# Altium footprint library FootPrintLib_0.PcbLib: 266 footprints (part 7 of 17)
Each footprint in its own frame and in the unit in brackets; x right, y up, seen from the top. Pads: shape width x height; smd on the part's side, far side on the other; paste and mask are expansions set on the pad; w line width, h text height; cw(c..) or ccw(c..) is an arc to the next point about the centre after c.
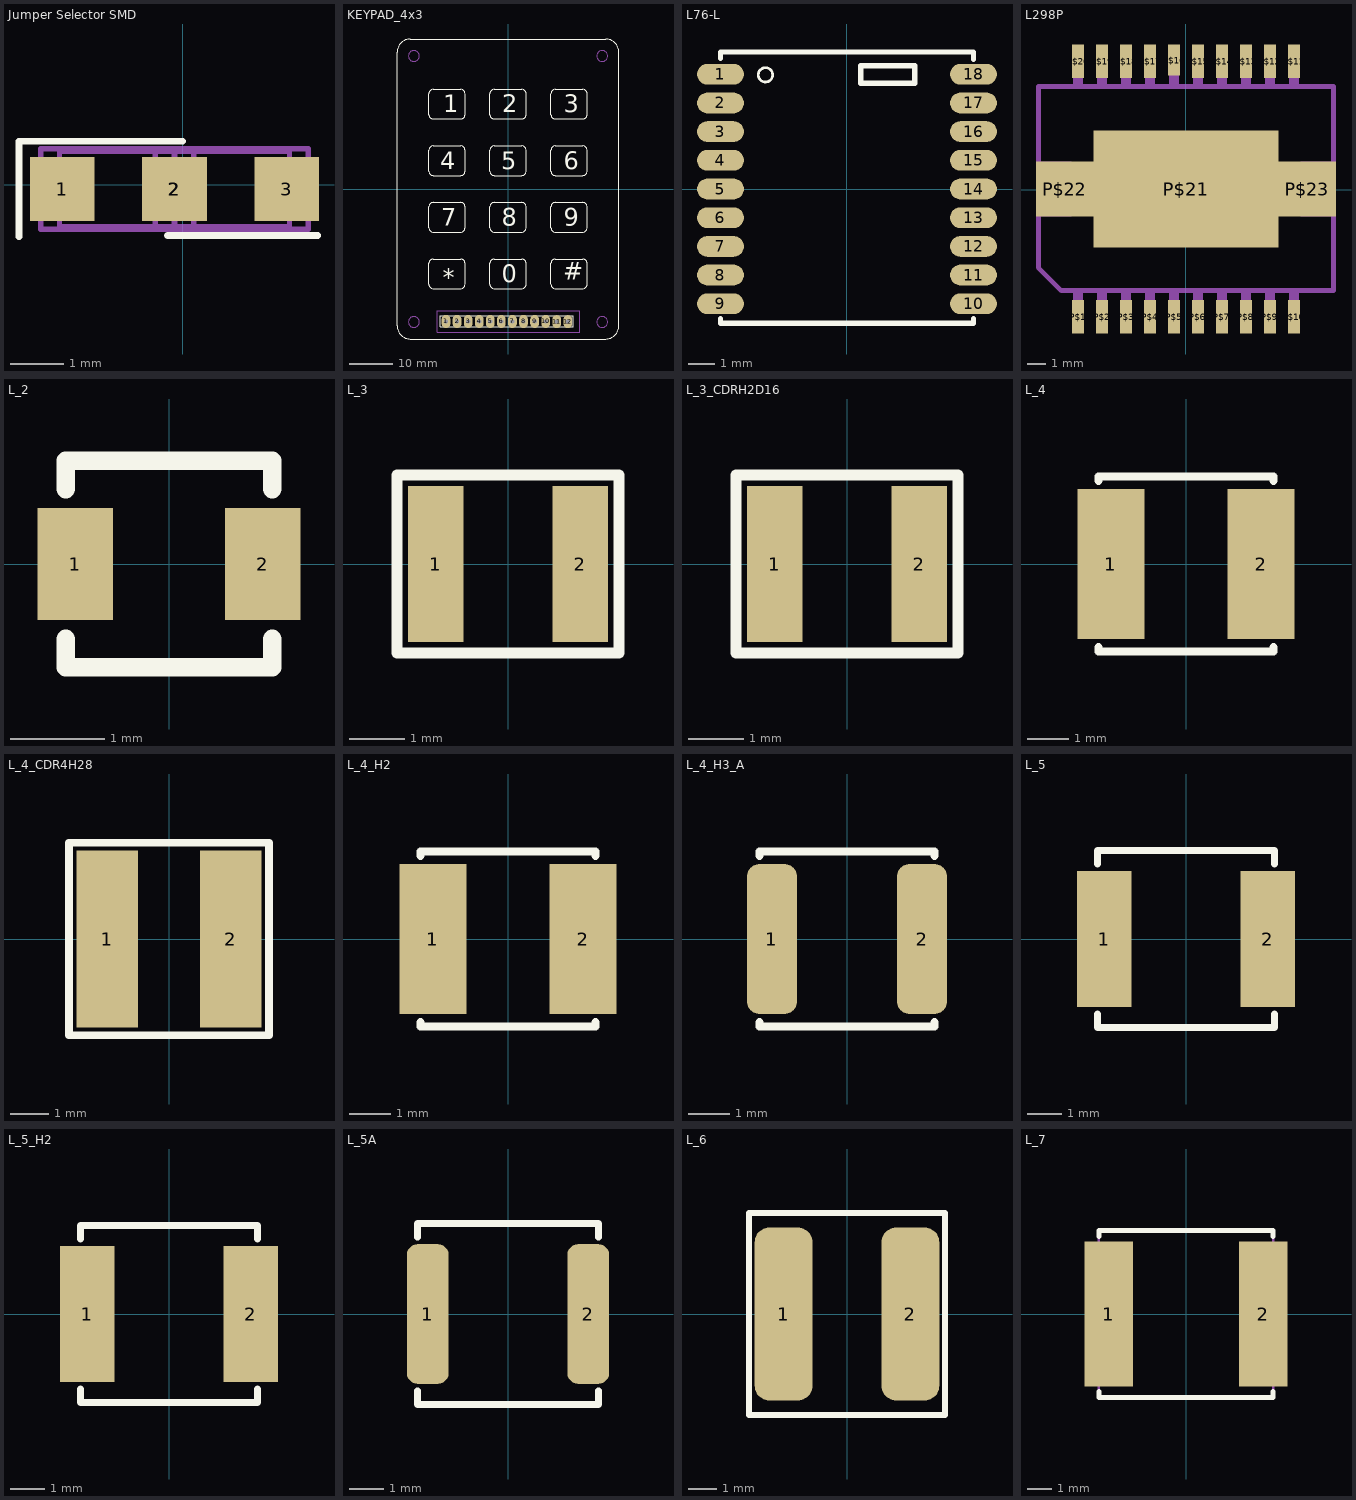
[diagram p6: the footprints below, top view; thin cyan lines are the x and y axes]

## Jumper Selector SMD [mm]
pads (4):
  rect 1.2x1.2 smd: 1(-2.244,-0.076) 2(-0.161,-0.076) 2(-0.144,-0.076) 3(1.939,-0.076)
Top Overlay:
  lines w0.127: -3.048,-0.965 -3.048,0.813 0,0.813 ; -0.279,-0.94 2.515,-0.94
Mechanical 13:
  lines w0.1: -2.294,-0.776 -2.294,0.624 -0.144,0.624 -0.144,-0.776 -2.294,-0.776 ; -0.161,-0.776 -0.161,0.624 1.989,0.624 1.989,-0.776 -0.161,-0.776
Mechanical 15:
  lines w0.1: -2.644,-0.826 -2.644,0.674 0.206,0.674 0.206,-0.826 -2.644,-0.826 ; -0.511,-0.826 -0.511,0.674 2.339,0.674 2.339,-0.826 -0.511,-0.826
3D body "0805.STEP": height 0.6, standoff 0, extent -2.235,-0.711 -0.203,0.559

## KEYPAD_4x3 [mm]
height 8
pads (12):
  oval 2x3 hole 1: 1(-14.224,-30.374) 2(-11.684,-30.374) 3(-9.144,-30.374) 4(-6.604,-30.374) 5(-4.064,-30.374) 6(-1.524,-30.374) 7(1.016,-30.374) 8(3.556,-30.374) 9(6.096,-30.374) 10(8.636,-30.374) 11(11.176,-30.425) 12(13.716,-30.425)
Top Overlay:
  lines w0.2: -15.494,-31.644 15.011,-31.644 15.011,-29.104 -15.494,-29.104 -15.494,-31.644
  lines w0.254: -25.4,-31.4 ccw(c-22.4,-31.4) -22.4,-34.4 22.4,-34.4 ccw(c22.4,-31.4) 25.4,-31.4 25.4,31.4 ccw(c22.4,31.4) 22.4,34.4 -22.4,34.4 ccw(c-22.4,31.4) -25.4,31.4 -25.4,-31.4 ; -18.15,-21.863 ccw(c-17.15,-21.863) -17.15,-22.863 -10.85,-22.863 ccw(c-10.85,-21.863) -9.85,-21.863 -9.85,-17.063 ccw(c-10.85,-17.063) -10.85,-16.063 -17.15,-16.063 ccw(c-17.15,-17.063) -18.15,-17.063 -18.15,-21.863 ; -18.15,-8.888 ccw(c-17.15,-8.888) -17.15,-9.888 -10.85,-9.888 ccw(c-10.85,-8.888) -9.85,-8.888 -9.85,-4.088 ccw(c-10.85,-4.088) -10.85,-3.087 -17.15,-3.087 ccw(c-17.15,-4.088) -18.15,-4.088 -18.15,-8.888 ; -18.15,4.088 ccw(c-17.15,4.088) -17.15,3.087 -10.85,3.087 ccw(c-10.85,4.088) -9.85,4.088 -9.85,8.888 ccw(c-10.85,8.888) -10.85,9.888 -17.15,9.888 ccw(c-17.15,8.888) -18.15,8.888 -18.15,4.088 ; -18.15,17.063 ccw(c-17.15,17.063) -17.15,16.063 -10.85,16.063 ccw(c-10.85,17.063) -9.85,17.063 -9.85,21.863 ccw(c-10.85,21.863) -10.85,22.863 -17.15,22.863 ccw(c-17.15,21.863) -18.15,21.863 -18.15,17.063 ; -4.15,-21.863 ccw(c-3.15,-21.863) -3.15,-22.863 3.15,-22.863 ccw(c3.15,-21.863) 4.15,-21.863 4.15,-17.063 ccw(c3.15,-17.063) 3.15,-16.063 -3.15,-16.063 ccw(c-3.15,-17.063) -4.15,-17.063 -4.15,-21.863 ; -4.15,-8.888 ccw(c-3.15,-8.888) -3.15,-9.888 3.15,-9.888 ccw(c3.15,-8.888) 4.15,-8.888 4.15,-4.088 ccw(c3.15,-4.088) 3.15,-3.087 -3.15,-3.087 ccw(c-3.15,-4.088) -4.15,-4.088 -4.15,-8.888 ; -4.15,4.088 ccw(c-3.15,4.088) -3.15,3.087 3.15,3.087 ccw(c3.15,4.088) 4.15,4.088 4.15,8.888 ccw(c3.15,8.888) 3.15,9.888 -3.15,9.888 ccw(c-3.15,8.888) -4.15,8.888 -4.15,4.088 ; -4.15,17.063 ccw(c-3.15,17.063) -3.15,16.063 3.15,16.063 ccw(c3.15,17.063) 4.15,17.063 4.15,21.863 ccw(c3.15,21.863) 3.15,22.863 -3.15,22.863 ccw(c-3.15,21.863) -4.15,21.863 -4.15,17.063 ; 9.85,-21.863 ccw(c10.85,-21.863) 10.85,-22.863 17.15,-22.863 ccw(c17.15,-21.863) 18.15,-21.863 18.15,-17.063 ccw(c17.15,-17.063) 17.15,-16.063 10.85,-16.063 ccw(c10.85,-17.063) 9.85,-17.063 9.85,-21.863 ; 9.85,-8.888 ccw(c10.85,-8.888) 10.85,-9.888 17.15,-9.888 ccw(c17.15,-8.888) 18.15,-8.888 18.15,-4.088 ccw(c17.15,-4.088) 17.15,-3.087 10.85,-3.087 ccw(c10.85,-4.088) 9.85,-4.088 9.85,-8.888 ; 9.85,4.088 ccw(c10.85,4.088) 10.85,3.087 17.15,3.087 ccw(c17.15,4.088) 18.15,4.088 18.15,8.888 ccw(c17.15,8.888) 17.15,9.888 10.85,9.888 ccw(c10.85,8.888) 9.85,8.888 9.85,4.088 ; 9.85,17.063 ccw(c10.85,17.063) 10.85,16.063 17.15,16.063 ccw(c17.15,17.063) 18.15,17.063 18.15,21.863 ccw(c17.15,21.863) 17.15,22.863 10.85,22.863 ccw(c10.85,21.863) 9.85,21.863 9.85,17.063
  text "*" at -14.919,-22.288 h4
  text "7" at -15.27,-8.393 h4
  text "4" at -15.524,4.572 h4
  text "1" at -14.889,17.558 h4
  text "#" at 12.633,-20.764 h4
  text "9" at 12.73,-8.393 h4
  text "6" at 12.73,4.572 h4
  text "3" at 12.73,17.558 h4
  text "2" at -1.27,17.558 h4
  text "5" at -1.524,4.572 h4
  text "8" at -1.397,-8.393 h4
  text "0" at -1.397,-21.368 h4
Mechanical 5:
  circle w0.254: c21.6,-30.5 r1.25
  circle w0.254: c-21.6,-30.5 r1.25
  circle w0.254: c-21.6,30.5 r1.25
  circle w0.254: c21.6,30.5 r1.25
  lines w0.254: -16.224,-32.874 16.459,-32.874 16.459,-27.874 -16.224,-27.874 -16.224,-32.874
3D body "User Library-Keypad 3x4.step": height 22.85, standoff 0.05, extent -26.429,-35.179 25.921,34.571
3D body "User Library-RM254_4pin.STEP": height 6.02, standoff -3.1, extent -0.254,-31.694 9.906,-29.154
3D body "User Library-RM254_4pin.STEP": height 6.02, standoff -3.1, extent -7.874,-31.694 2.286,-29.154
3D body "User Library-RM254_4pin.STEP": height 6.02, standoff -3.1, extent -15.494,-31.694 -5.334,-29.154
3D body "User Library-RM254_4pin.STEP": height 6.02, standoff -3.1, extent 4.724,-31.725 14.884,-29.185

## L76-L [mm]
pads (18):
  oval 1.8x0.8 smd: 1(-4.85,4.4) 2(-4.85,3.3) 3(-4.85,2.2) 4(-4.85,1.1) 5(-4.85,0) 6(-4.85,-1.1) 7(-4.85,-2.2) 8(-4.85,-3.3) 9(-4.85,-4.4) 10(4.85,-4.4) 11(4.85,-3.3) 12(4.85,-2.2) 13(4.85,-1.1) 14(4.85,0) 15(4.85,1.1) 16(4.85,2.2) 17(4.85,3.3) 18(4.85,4.4)
Top Overlay:
  circle w0.1: c-3.125,4.375 r0.275
  lines w0.2: -4.85,-4.975 -4.85,-5.15 4.85,-5.15 4.85,-4.975 ; -4.85,5 -4.85,5.25 4.85,5.25 4.85,4.975 ; 0.525,4.05 2.6,4.05 2.6,4.725 0.525,4.725 0.525,4.05
3D body "Quectel L76-L.stp": height 2.51, standoff -0.01, extent -4.825,-4.999 4.875,5.101

## L298P [mil]
pads (23):
  rect 25x70 smd: P$1(-224.74,-265.18) P$2(-174.74,-265.18) P$3(-124.74,-265.18) P$4(-74.74,-265.18) P$5(-24.74,-265.18) P$6(25.26,-265.18) P$7(75.26,-265.18) P$8(125.26,-265.18) P$9(175.26,-265.18) P$10(225.26,-265.18) P$11(225.26,268.82) P$12(175.26,268.82) P$13(125.26,268.82) P$14(75.26,268.82) P$15(25.26,268.82) P$17(-74.74,268.82) P$18(-124.74,268.82) P$19(-174.74,268.82) P$20(-224.74,268.82)
  rect 25x65 smd: P$16(-24.74,270.82)
  rect 386x244 smd: P$21(0.26,1.82)
  rect 120x115 smd: P$22(-252.74,1.82) P$23(253.26,1.82)
Mechanical 13:
  region: -214.74,218.84 -234.77,218.84 -234.77,280.82 -214.74,280.82
  region: -164.74,219.11 -184.99,219.11 -184.99,280.82 -164.74,280.82
  region: -114.74,218.83 -134.75,218.83 -134.75,280.82 -114.74,280.82
  region: -64.74,219.02 -84.82,219.02 -84.82,280.82 -64.74,280.82
  region: -14.74,218.82 -34.74,218.82 -34.74,280.82 -14.74,280.82
  region: 35.26,218.94 15.27,218.94 15.27,280.82 35.26,280.82
  region: 85.26,219 65.31,219 65.31,280.82 85.26,280.82
  region: 135.26,219.05 115.38,219.05 115.38,280.82 135.26,280.82
  region: 185.26,219.13 165.5,219.13 165.5,280.82 185.26,280.82
  region: 235.26,218.85 215.29,218.85 215.29,280.82 235.26,280.82
  region: 235.26,-275.69 215.65,-275.69 215.65,-213.18 235.26,-213.18
  region: 185.26,-275.37 165.37,-275.37 165.37,-213.18 185.26,-213.18
  region: 135.26,-275.23 115.28,-275.23 115.28,-213.18 135.26,-213.18
  region: 85.26,-275.51 65.34,-275.51 65.34,-213.18 85.26,-213.18
  region: 35.26,-275.42 15.27,-275.42 15.27,-213.18 35.26,-213.18
  region: -14.74,-275.3 -34.76,-275.3 -34.76,-213.18 -14.74,-213.18
  region: -64.74,-275.27 -84.77,-275.27 -84.77,-213.18 -64.74,-213.18
  region: -114.74,-275.72 -135,-275.72 -135,-213.18 -114.74,-213.18
  region: -164.74,-275.3 -184.82,-275.3 -184.82,-213.18 -164.74,-213.18
  region: -214.74,-275.21 -234.77,-275.21 -234.77,-213.18 -214.74,-213.18
  lines w5: -307.74,-53.18 -239.74,-53.18 -239.74,56.82 -307.74,56.82 ; 310.26,-53.18 240.26,-53.18 240.26,56.82 310.26,56.82
  lines w10: -307.74,-162.18 -307.74,-53.18 -307.74,56.82 -307.74,215.82 308.26,215.82 308.26,-210.18 -259.74,-210.18 -307.74,-162.18
3D body "L298P_axisY.step": height 140.16, standoff -1.57, extent -314.69,-273.61 315.23,297.26

## L_2 [mm] "INDUCTOR, 2.0X2.0mm"
pads (2):
  rect 0.8x1.2 smd: 1(-1,0) 2(1,0)
Top Overlay:
  lines w0.2: -1.1,-0.8 -1.1,-1.1 1.1,-1.1 1.1,-0.8 ; -1.1,0.8 -1.1,1.1 1.1,1.1 1.1,0.8
3D body: height 2, standoff 0, extent -1,-1 1,1

## L_3 [mm] "INDUCTOR, 3.0X3.2mm, VLS3012"
pads (2):
  rect 1x2.8 smd mask+0.1: 1(-1.3,0) 2(1.3,0)
Top Overlay:
  lines w0.2: -2,-1.6 -2,1.6 2,1.6 2,-1.6 -2,-1.6
3D body: height 1.2, standoff 0, extent -1.5,-1.5 1.5,1.5

## L_3_CDRH2D16 [mm] "INDUCTOR, 3.0X3.2mm, CDRH2D16"
height 1.6
pads (2):
  rect 1x2.8 smd mask+0.1: 1(-1.3,0) 2(1.3,0)
Top Overlay:
  lines w0.2: -2,-1.6 2,-1.6 2,1.6 -2,1.6 -2,-1.6
3D body: height 1.2, standoff 0, extent -1.5,-1.5 1.5,1.5

## L_4 [mm] "INDUCTOR, 3.8x3.8mm, 3.7x3.5mm, WURTH 744031470"
height 1.7
pads (2):
  rect 1.6x3.6 smd: 1(-1.8,0) 2(1.8,0)
Top Overlay:
  lines w0.2: -2.1,-2 -2.1,-2.1 2.1,-2.1 2.1,-2 ; -2.1,2 -2.1,2.1 2.1,2.1 2.1,2
3D body: height 1.7, standoff 0, extent -2,-2 2,2

## L_4_CDR4H28 [mm] "INDUCTOR, 4X4X2.8mm, CDR4H28"
height 2.8
pads (2):
  rect 1.6x4.6 smd: 1(-1.6,0) 2(1.6,0)
Top Overlay:
  lines w0.2: -2.6,-2.5 -2.6,2.5 2.6,2.5 2.6,-2.5 -2.6,-2.5
3D body "User Library-CDRH4D28.step": height 2.91, standoff 0, extent -2.45,-2.45 2.45,2.45

## L_4_H2 [mm] "INDUCTOR, 4.1X4.1X2.1mm, VLCF4020"
height 2.1
pads (2):
  rect 1.6x3.6 smd: 1(-1.8,0) 2(1.8,0)
Top Overlay:
  lines w0.2: -2.1,-2 -2.1,-2.1 2.1,-2.1 2.1,-2 ; -2.1,2 -2.1,2.1 2.1,2.1 2.1,2
3D body "User Library-VLCF4020.step": height 2, standoff 0, extent -2.05,-2 2.05,2

## L_4_H3_A [mm] "INDUCTOR, 4X4X2.8mm"
height 2.8
pads (2):
  rrect50% 1.2x3.6 smd: 1(-1.8,0) 2(1.8,0)
Top Overlay:
  lines w0.2: -2.1,-2 -2.1,-2.1 2.1,-2.1 2.1,-2 ; -2.1,2 -2.1,2.1 2.1,2.1 2.1,2
3D body "User Library-VLCF4020.step": height 2, standoff 0, extent -2.05,-2 2.05,2

## L_5 [mm] "INDUCTOR, 5.0X5.0mm"
pads (2):
  rect 1.6x4 smd: 1(-2.4,0) 2(2.4,0)
Top Overlay:
  lines w0.2: -2.6,-2.2 -2.6,-2.6 2.6,-2.6 2.6,-2.2 ; -2.6,2.2 -2.6,2.6 2.6,2.6 2.6,2.2
3D body: height 3, standoff 0, extent -2.5,-2.5 2.5,2.5

## L_5_H2 [mm] "INDUCTOR, 5.0X5.0X2mm"
pads (2):
  rect 1.6x4 smd: 1(-2.4,0) 2(2.4,0)
Top Overlay:
  lines w0.2: -2.6,-2.2 -2.6,-2.6 2.6,-2.6 2.6,-2.2 ; -2.6,2.2 -2.6,2.6 2.6,2.6 2.6,2.2
3D body: height 2, standoff 0, extent -2.5,-2.5 2.5,2.5

## L_5A [mm] "INDUCTOR, 5.0X5.0mm"
pads (2):
  rrect50% 1.2x4 smd mask+0.075: 1(-2.3,0) 2(2.3,0)
Top Overlay:
  lines w0.2: -2.6,-2.2 -2.6,-2.6 2.6,-2.6 2.6,-2.2 ; -2.6,2.2 -2.6,2.6 2.6,2.6 2.6,2.2
3D body: height 3, standoff 0, extent -2.5,-2.5 2.5,2.5

## L_6 [mm] "INDUCTOR, 6.0X6.0mm, SRP6030, XAL6030"
height 3
pads (2):
  rrect50% 2x6 smd: 1(-2.2,0) 2(2.2,0)
Top Overlay:
  lines w0.2: -3.4,-3.5 3.4,-3.5 3.4,3.5 -3.4,3.5 -3.4,-3.5
3D body "Coilcraft-XAL6030.step": height 3.1, standoff 0, extent -3.28,-3.38 3.28,3.38

## L_7 [mm] "INDUCTOR, 7.2X6.9mm, 7.1X6.5mm, SPM6530"
height 4.5
pads (2):
  rect 2x6 smd: 1(-3.2,0) 2(3.2,0)
Top Overlay:
  lines w0.2: -3.6,-3.2 -3.6,-3.45 3.6,-3.45 3.6,-3.2 ; -3.6,3.2 -3.6,3.45 3.6,3.45 3.6,3.2
Mechanical 13:
  lines w0.1: -3.6,-3.45 -3.6,3.45 3.6,3.45 3.6,-3.45 -3.6,-3.45
3D body "User Library-FP3-Cooper.step": height 3, standoff 0, extent -3.625,-3.35 3.625,3.35